# EAGLE library part OPA445AU (library OPA445AU)
Operational Amplifiers - Op Amps Hi Voltage FET-Input Op Amp Source: Datasheet <http://www.ti.com/lit/ds/symlink/opa445.pdf>
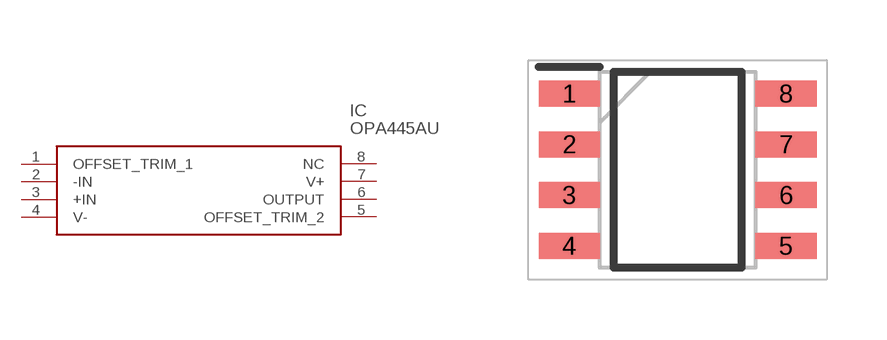
[diagram p0: symbol with the pads of SOIC127P600X175-8N; footprint SOIC127P600X175-8N]

Designator prefix IC

## OPA445AU (Description: Operational Amplifiers - Op Amps Hi Voltage FET-Input Op Amp; Height: 1.75mm; Manufacturer_Name: Texas Instruments; Manufacturer_Part_Number: OPA445AU; Mouser_Part_Number: 595-OPA445AU; Mouser_Price-Stock: https://www.mouser.co.uk/ProductDetail/Texas-Instruments/OPA445AU?qs=wgAEGBTxy7lNjLIKPSQ4Sw%3D%3D)  [SOIC127P600X175-8N]
1  OFFSET_TRIM_1
2  -IN
3  +IN
4  V-
5  OFFSET_TRIM_2
6  OUTPUT
7  V+
8  NC  nc

## Footprint SOIC127P600X175-8N (pad centres in mm)
D0008A SOIC
smd 1.528 x 0.65: 1 -2.711,1.905; 2 -2.711,0.635; 3 -2.711,-0.635; 4 -2.711,-1.905; 5 2.711,-1.905; 6 2.711,-0.635; 7 2.711,0.635; 8 2.711,1.905